# Altium footprint library custom-case.PcbLib: 483 footprints (part 17 of 31)
Each footprint in its own frame and in the unit in brackets; x right, y up, seen from the top. Pads: shape width x height; smd on the part's side, far side on the other; paste and mask are expansions set on the pad; w line width, h text height; cw(c..) or ccw(c..) is an arc to the next point about the centre after c.
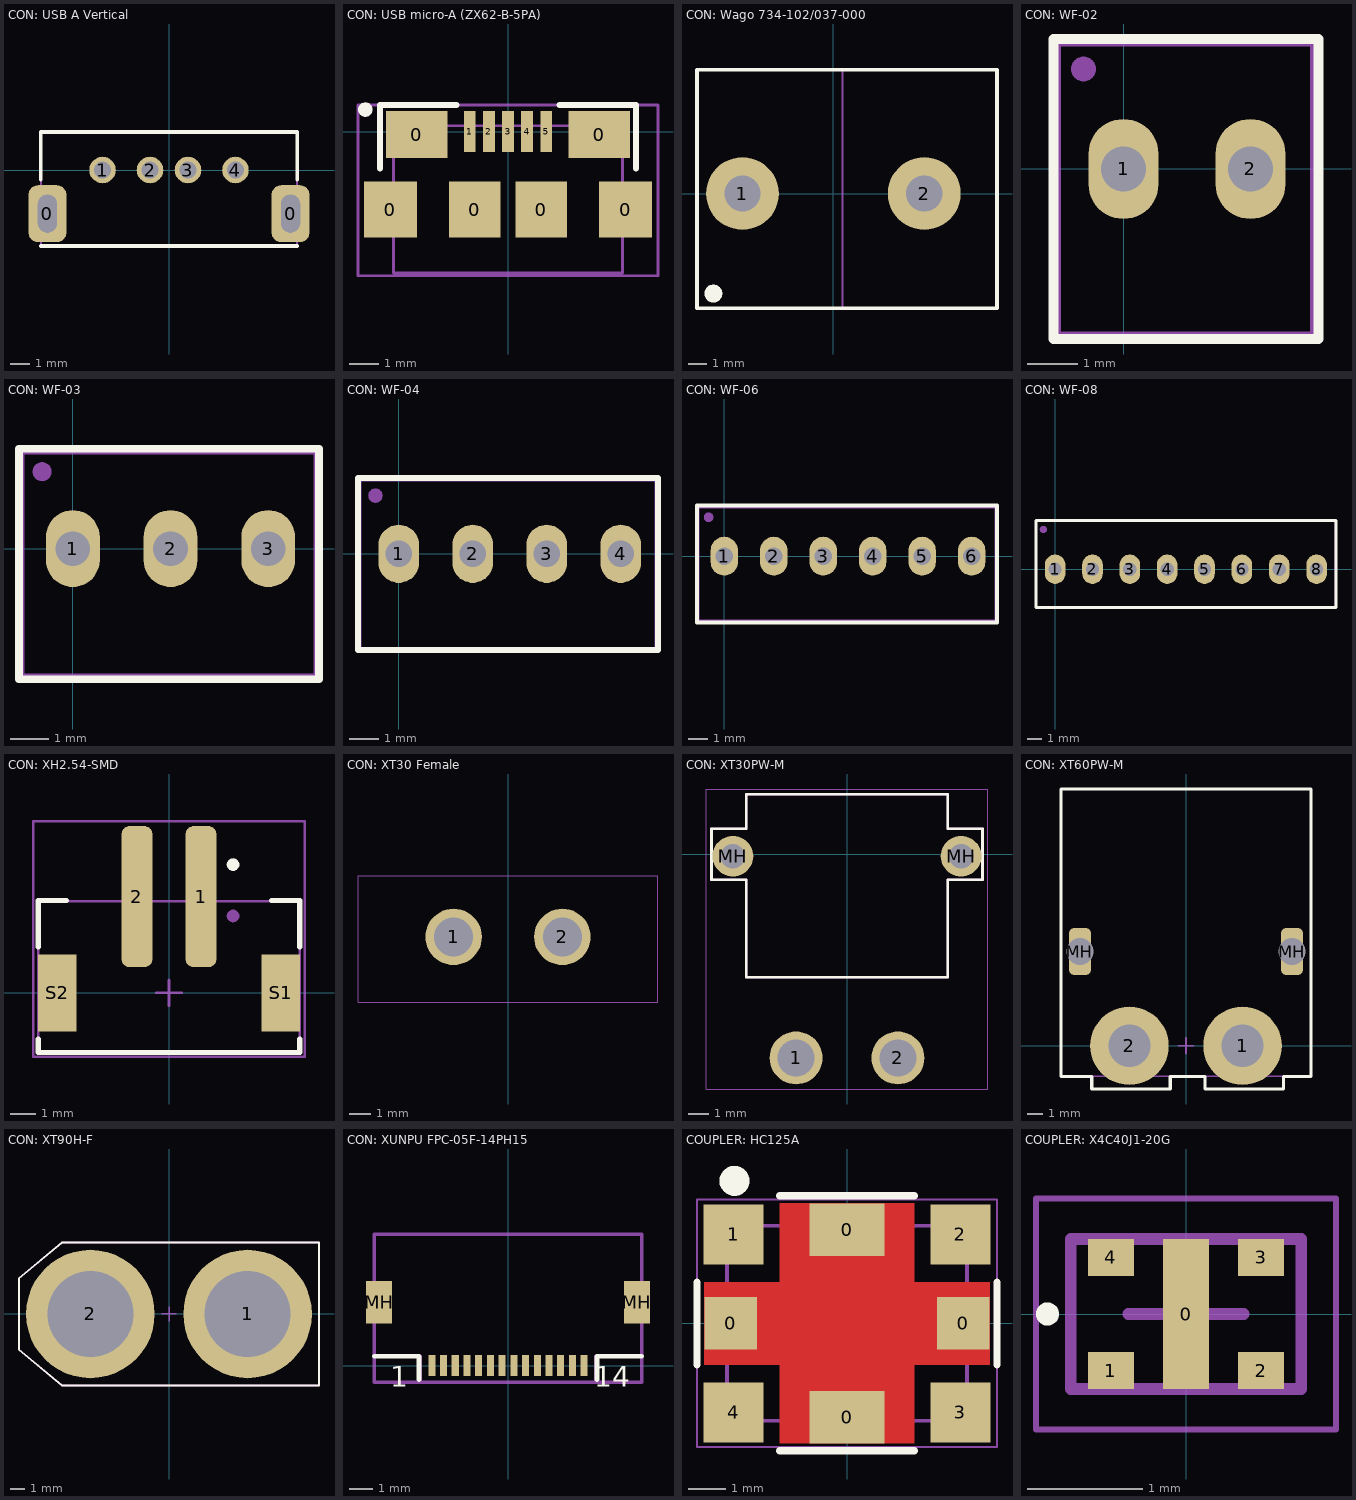
[diagram p16: the footprints below, top view; thin cyan lines are the x and y axes]

## CON: USB A Vertical [mm]
height 5
pads (6):
  rrect50% 2x3 hole 2 slot 1 at 0 deg: 0(-6.4,-2.3) 0(6.4,-2.3)
  round 1.4 hole 0.9: 1(-3.5,0) 2(-1,0) 3(1,0) 4(3.5,0)
Top Overlay:
  lines w0.2: -6.75,-4 6.75,-4 ; -6.75,-0.5 -6.75,2 6.75,2 6.75,-0.5
Top Assy:
  lines w0.1: -6.75,-4 -6.75,2 6.75,2 6.75,-4 -6.75,-4
Size Area:
  lines w0.1: -6.75,-4 -6.75,2 6.75,2 6.75,-4 -6.75,-4
3D body "USB_A_Vertical.STEP": height 17.5, standoff -3, extent -6.55,-3.86 6.55,1.86

## CON: USB micro-A (ZX62-B-5PA) [mm]
height 5
pads (12):
  rect 1.8x1.9 smd: 0(-4,-2.65) 0(4,-2.65)
  rect 2.1x1.6 smd: 0(-3.1,-0.1) 0(3.1,-0.1)
  rect 1.75x1.9 smd: 0(-1.125,-2.65) 0(1.125,-2.65)
  rect 0.4x1.4 smd: 1(-1.3,0) 2(-0.65,0) 3(0,0) 4(0.65,0) 5(1.3,0)
  round 0.5 on Top Overlay: ""(-4.85,0.75)
Top Overlay:
  lines w0.2: -4.35,-1.25 -4.35,0.9 -1.75,0.9 ; 1.75,0.9 4.35,0.9 4.35,-1.25
Top Assy:
  lines w0.1: -3.9,-4.8 -3.9,0.2 3.9,0.2 3.9,-4.8 -3.9,-4.8
Size Area:
  lines w0.1: -5.1,-4.9 -5.1,0.9 5.1,0.9 5.1,-4.9 -5.1,-4.9
3D body "User Library-micro usb SMD.STEP": height 2.68, standoff -0.02, extent -3.9,-4.8 3.9,0.2

## CON: Wago 734-102/037-000 [mm]
pads (3):
  round 4 hole 2: 1(-5,0) 2(5,0)
  round 1 on Top Overlay: ""(-6.6,-5.5)
Top Overlay:
  lines w0.2: -7.5,-6.3 -7.5,6.8 9,6.8 9,-6.3 -7.5,-6.3
Top Assy:
  lines w0.1: 0.5,-6.25 0.5,6.8 ; -7.5,-6.3 -7.5,6.8 9,6.8 9,-6.3 -7.5,-6.3
Size Area:
  lines w0.1: -7.5,6.8 9,6.8 9,-6.3 -7.5,-6.3 -7.5,6.8
3D body "Pin N=2 v3.step": height 15.85, standoff -1.95, extent -7.5,-6.3 9,8

## CON: WF-02 [mm]
pads (3):
  oval 1.4x2 hole 0.9: 1(0,0) 2(2.54,0)
  round 0.5 on Mech1: ""(-0.8,2)
Top Overlay:
  lines w0.2: -1.4,-3.4 3.9,-3.4 3.9,2.6 -1.4,2.6 -1.4,-3.4
Top Assy:
  lines w0.1: -1.3,-3.3 -1.3,2.5 3.78,2.5 3.78,-3.3 -1.3,-3.3
3D body "User Library-WF-02.STEP": height 11.5, standoff -3.3, extent -1.3,-3.3 3.78,2.5

## CON: WF-03 [mm]
pads (4):
  oval 1.4x2 hole 0.9: 1(0,0) 2(2.54,0) 3(5.08,0)
  round 0.5 on Mech1: ""(-0.8,2)
Top Overlay:
  lines w0.2: -1.4,-3.4 -1.4,2.6 6.4,2.6 6.4,-3.4 -1.4,-3.4
Top Assy:
  lines w0.1: -1.31,-3.3 -1.31,2.5 6.31,2.5 6.31,-3.3 -1.31,-3.3
3D body "User Library-WF-03.STEP": height 11.5, standoff -3.3, extent -1.31,-3.3 6.31,2.5

## CON: WF-04 [mm]
pads (5):
  oval 1.4x2 hole 0.9: 1(0,0) 2(2.54,0) 3(5.08,0) 4(7.62,0)
  round 0.5 on Mech1: ""(-0.8,2)
Top Overlay:
  lines w0.2: -1.4,-3.3 8.9,-3.3 8.9,2.6 -1.4,2.6 -1.4,-3.3
Top Assy:
  lines w0.1: -1.33,-3.273 8.83,-3.273 8.83,2.527 -1.33,2.527 -1.33,-3.273
3D body "User Library-WF-04.STEP": height 11.66, standoff -3.14, extent -1.33,-3.273 8.83,2.527

## CON: WF-06 [mm]
pads (7):
  oval 1.4x2 hole 0.9: 1(0,0) 2(2.54,0) 3(5.08,0) 4(7.62,0) 5(10.16,0) 6(12.7,0)
  round 0.5 on Mech1: ""(-0.8,2)
Top Overlay:
  lines w0.2: -1.4,-3.4 -1.4,2.6 14,2.6 14,-3.4 -1.4,-3.4
Top Assy:
  lines w0.1: -1.32,-3.3 -1.32,2.5 13.92,2.5 13.92,-3.3 -1.32,-3.3
3D body "User Library-WF-06.STEP": height 11.5, standoff -3.3, extent -1.32,-3.3 13.92,2.5

## CON: WF-08 [mm]
pads (9):
  oval 1.4x2 hole 0.9: 1(0,0) 2(2.54,0) 3(5.08,0) 4(7.62,0) 5(10.16,0) 6(12.7,0) 7(15.24,0) 8(17.78,0)
  round 0.5 on Mech1: ""(-0.8,2.7)
Top Overlay:
  lines w0.2: -1.3,-2.6 -1.3,3.3 19.1,3.3 19.1,-2.6 -1.3,-2.6
Top Assy:
  lines w0.1: -1.27,-2.54 19.05,-2.54 19.05,3.26 -1.27,3.26 -1.27,-2.54
3D body "User Library-WF-8.STEP": height 11.4, standoff -3.4, extent -1.27,-2.54 19.05,3.26

## CON: XH2.54-SMD [mm]
height 7.7
pads (6):
  rrect50% 1.2x5.5 smd: 1(1.25,3.75) 2(-1.25,3.75)
  rect 1.5x3 smd: S1(4.35,0) S2(-4.35,0)
  round 0.5 on Mech1: ""(2.5,3)
  round 0.5 on Top Overlay: ""(2.5,5)
Top Overlay:
  lines w0.2: -5.1,-1.8 -5.1,-2.325 5.1,-2.325 5.1,-1.8 ; -5.1,1.8 -5.1,3.6 -4,3.6 ; 4,3.6 5.1,3.6 5.1,1.8
Top Assy:
  lines w0.1: -5.1,-2.3 -5.1,3.575 5.1,3.575 5.1,-2.3 -5.1,-2.3
Size Area:
  lines w0.1: -0.5,0 0.5,0 ; 0,-0.5 0,0.5 ; -5.3,-2.5 5.3,-2.5 5.3,6.7 -5.3,6.7 -5.3,-2.5
3D body "XUNPU WAFER-XH2.54-2PLB.STEP": height 7.8, standoff 0, extent -5,-2.2 5,6.1

## CON: XT30 Female [mm]
pads (2):
  round 2.6 hole 1.8: 1(-2.5,-10) 2(2.5,-10)
Size Area:
  lines w0.05: -6.9,-13 -6.9,-7.2 6.9,-7.2 6.9,-13 -6.9,-13
3D body "XT30.STEP": height 12.6, standoff -3, extent -5.225,-12.7 5.225,-7.45

## CON: XT30PW-M [mm]
pads (4):
  round 2.6 hole 1.8: 1(-2.5,-10) 2(2.5,-10)
  round 2 hole 1.2: MH(-5.6,-0.1) MH(5.6,-0.1)
Top Overlay:
  lines w0.127: -6.65,-1.25 -6.65,1.25 -4.95,1.25 -4.95,2.95 4.95,2.95 4.95,1.25 6.65,1.25 6.65,-1.25 4.95,-1.25 4.95,-6.05 -4.95,-6.05 -4.95,-1.25 -6.65,-1.25
3D model:
  lines w0.127: -6.65,-1.25 -6.65,1.25 -4.95,1.25 -4.95,2.95 4.95,2.95 4.95,1.25 6.65,1.25 6.65,-1.25 4.95,-1.25 4.95,-6.05 -4.95,-6.05 -4.95,-1.25 -6.65,-1.25
Size Area:
  lines w0.05: -6.9,-11.525 6.9,-11.525 6.9,3.2 -6.9,3.2 -6.9,-11.525
3D body "Amass_XT30PW-M_pcb solder.stp": height 5.5, standoff -2.95, extent -6.65,-10.95 6.65,3

## CON: XT60PW-M [mm]
pads (4):
  round 5 hole 2.7: 1(3.6,0) 2(-3.6,0)
  rrect50% 1.4x3 hole 1.7 square: MH(-6.75,6) MH(6.75,6)
Top Overlay:
  lines w0.2: -7.95,-1.95 -6,-1.95 -6,-2.75 -1,-2.75 -1,-1.95 1.2,-1.95 1.2,-2.75 6.2,-2.75 6.2,-1.95 7.95,-1.95 7.95,16.35 -7.95,16.35 -7.95,-1.95
Top Assy:
  lines w0.1: -7.95,-1.95 7.95,-1.95 7.95,16.35 -7.95,16.35 -7.95,-1.95
Size Area:
  lines w0.1: -0.5,0 0.5,0 ; 0,-0.5 0,0.5 ; -7.95,-1.95 -7.95,16.35 7.95,16.35 7.95,-1.95 6.2,-1.95 6.2,-2.75 1.2,-2.75 1.2,-1.95 -1,-1.95 -1,-2.75 -6,-2.75 -6,-1.95 -7.95,-1.95
3D body "XT60PW.SLDPRT": height 8.5, standoff -2, extent -7.95,-1.95 7.95,16.35

## CON: XT90H-F [mm]
pads (2):
  round 9 hole 6: 1(5.5,0) 2(-5.5,0)
Top Overlay:
  lines w0.127: -10.5,-2.5 -10.5,2.5 -7.5,5 10.5,5 10.5,-5 -7.5,-5 -10.5,-2.5
Size Area:
  lines w0.1: -0.5,0 0.5,0 ; 0,-0.5 0,0.5
  lines w0.127: -10.5,-2.5 -10.5,2.5 -7.5,5 10.5,5 10.5,-5 -7.5,-5 -10.5,-2.5
3D body "XT90H-M SBORKA PART.STEP": height 21.3, standoff -4.9, extent -10.466,-5.418 10.534,5.382

## CON: XUNPU FPC-05F-14PH15 [mm] "FPC 14pin connector"
pads (16):
  rect 0.3x0.9 smd mask+0.075: 1(-3.25,0) 2(-2.75,0) 3(-2.25,0) 4(-1.75,0) 5(-1.25,0) 6(-0.75,0) 7(-0.25,0) 8(0.25,0) 9(0.75,0) 10(1.25,0) 11(1.75,0) 12(2.25,0) 13(2.75,0) 14(3.25,0)
  rect 1.1x1.8 smd mask+0.075: MH(-5.5,2.7) MH(5.5,2.7)
Top Overlay:
  lines w0.2: -5.7,0.4 -3.8,0.4 -3.8,-0.6 ; 3.8,-0.6 3.8,0.4 5.7,0.4
  text "14" at 3.687,-1.195 h1.5
  text "1" at -5.019,-1.195 h1.5
Top Assy:
  lines w0.15: -5.7,-0.7 -5.7,5.6 5.7,5.6 5.7,-0.7 0,-0.7 -5.7,-0.7
Size Area:
  lines w0.15: -5.7,0.4 -5.7,5.6 5.7,5.6 5.7,0.4 3.75,0.4 3.75,-0.7 0,-0.7 -3.75,-0.7 -3.75,0.4 -5.7,0.4
3D body "FPC-14.stp": height 2.11, standoff 0, extent -5.65,-0.3 5.65,5.55

## COUPLER: HC125A [mm] "Hybrid Coupler"
height 12
pads (8):
  rect 1.4x1.4 smd: 0(-3.1,0) 0(3.1,0)
  rect 2x1.4 smd: 0(0,-2.5) 0(0,2.5)
  rect 1.6x1.6 smd: 1(-3.025,2.375) 2(3.025,2.375) 3(3.025,-2.375) 4(-3.025,-2.375)
Top Layer:
  region: -3.8,1.1 -1.8,1.1 -1.8,3.2 1.8,3.2 1.8,1.1 3.8,1.1 3.8,-1.1 1.8,-1.1 1.8,-3.2 -1.8,-3.2 -1.8,-1.1 -3.8,-1.1
Top Overlay:
  circle w0.4: c-3,3.8 r0.2
  lines w0.2: -4,-1.1 -4,1.1 ; -1.8,-3.4 1.8,-3.4 ; -1.8,3.4 1.8,3.4 ; 4,-1.1 4,1.1
3D model:
  lines w0.1: -3.2,-2.6 3.2,-2.6 3.2,2.6 -3.2,2.6 -3.2,-2.6
Size Area:
  lines w0.05: -4,-3.3 4,-3.3 4,3.3 -4,3.3 -4,-3.3
  lines w0.1: -0.5,0 0.5,0 ; 0,-0.5 0,0.5
3D body "HC125A.STEP": height 1.51, standoff 0, extent -3.175,-2.54 3.175,2.54

## COUPLER: X4C40J1-20G [mm] "Directional Coupler"
height 12
pads (5):
  rect 0.4x1.3 smd: 0(0,0)
  rect 0.4x0.32 smd: 1(-0.65,-0.49) 2(0.65,-0.49) 3(0.65,0.49) 4(-0.65,0.49)
Top Overlay:
  circle w0.1: c-1.2,0 r0.05
3D model:
  lines w0.1: -1,-0.65 -1,0.65 1,0.65 1,-0.65 -1,-0.65
Size Area:
  lines w0.05: -1.3,-1 -1.3,1 1.3,1 1.3,-1 -1.3,-1
  lines w0.1: -0.5,0 0.5,0 ; 0,-0.5 0,0.5
3D body "X4C40J1-20G.stp": height 0.6, standoff 0.01, extent -1.019,-0.644 1.019,0.644